# Altium footprint library Diode.PcbLib: 34 footprints (part 3 of 3)
Each footprint in its own frame and in the unit in brackets; x right, y up, seen from the top. Pads: shape width x height; smd on the part's side, far side on the other; paste and mask are expansions set on the pad; w line width, h text height; cw(c..) or ccw(c..) is an arc to the next point about the centre after c.
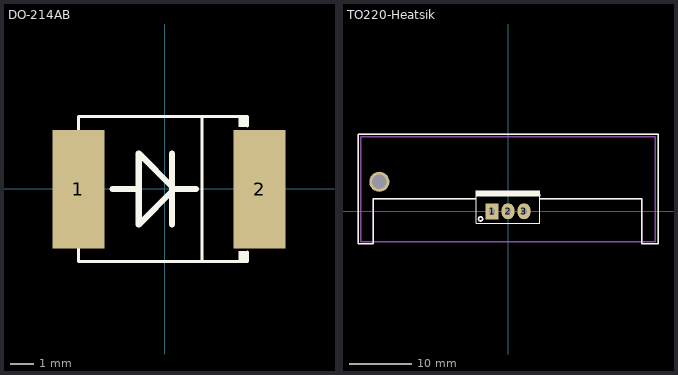
[diagram p2: the footprints below, top view; thin cyan lines are the x and y axes]

## DO-214AB [mm] "DO-214AB"
height 3
pads (2):
  rect 2.2x5 smd: 1(-3.637,-0.008) 2(3.983,-0.008)
Top Overlay:
  rectangle: 3.1,-3.1 3.5,-2.6
  rectangle: 3.1,2.6 3.5,3.1
  lines w0.127: -3.637,-2.421 -3.637,-3.056 3.475,-3.056 3.475,-2.65 ; -3.637,2.405 -3.637,3.04 3.475,3.04 3.475,2.65 ; 1.57,-3.056 1.57,3.04
  lines w0.254: -2.2,0 -1.2,0 ; 0.3,-1.5 0.3,1.5 ; 1.3,0 0.4,0 ; 0.4,0 -1.1,1.5 -1.1,-1.5 0.4,0
Mechanical 1:
  lines w0.025: -3.637,-3.056 3.475,-3.056 ; -3.637,3.04 3.475,3.04
3D body "User Library-Diode Molded 5025Body.step": height 2.13, standoff -0.03, extent -4,-2.975 3.9,3.025

## TO220-Heatsik [mil] "TO-220"
height 200
pads (4):
  rect 80x100 hole 39: 1(-100,0)
  oval 80x100 hole 39: 2(0,0) 3(100,0)
  round 125.98 hole 90.55: ""(-807.09,185.04)
Top Overlay:
  circle w10: c-172.03,-48 r12.97
  rectangle: -199,94 200,130
  lines w7: 198,107 199,93 ; -200,-75 -199,-76 -176,-76 200,-76 199,-75 199,130 -200,130 -200,-75
  lines w7.87: -200.79,78.74 -846.46,78.74 -846.46,43.31 -846.46,-204.72 -940.94,-204.72 -940.94,484.25 940.94,484.25 940.94,-204.72 838.58,-204.72 838.58,78.74 200.79,78.74
Mechanical 1:
  lines w7.87: -925.2,-190.24 -925.2,467.24 925.19,467.24 925.19,-190.24 -925.2,-190.24
Mechanical 15:
  lines w7.87: -940.94,-204.72 -940.94,484.25 940.94,484.25 940.94,-204.72 ; -846.46,-204.72 -846.46,43.31 -846.46,78.74 -200.79,78.74 ; 200.79,78.74 838.58,78.74 838.58,-204.72
  text "+" at -20.32,-30.31 h60
3D body "Part2.STEP": height 1653.54, standoff -39.37, extent -925.2,-190.24 925.19,467.24
3D body "User Library-TO-220-1.STEP": height 322.83, standoff -810.24, extent -194.88,-80 194.88,97.17